# Altium footprint library LED_PCB_Large_Custom.PcbLib: 1 footprints
Each footprint in its own frame and in the unit in brackets; x right, y up, seen from the top. Pads: shape width x height; smd on the part's side, far side on the other; paste and mask are expansions set on the pad; w line width, h text height; cw(c..) or ccw(c..) is an arc to the next point about the centre after c.
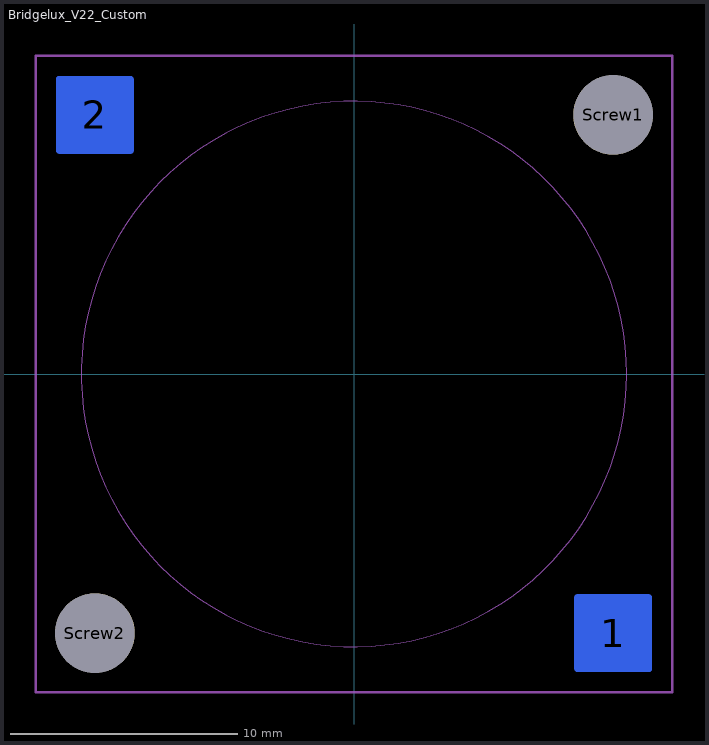
[diagram p0: the footprint, top view; thin cyan lines are the x and y axes]

## Bridgelux_V22_Custom [mm]
pads (4):
  rrect7% 3.4x3.4 smd far side paste-2539.97: 1(11.4,-11.4) 2(-11.4,11.4)
  round 3.5 hole 3.5 unplated: Screw1(11.4,11.4) Screw2(-11.4,-11.4)
LED Cutout Reference:
  circle w0.05: c0,0 r12
F.Fab:
  lines w0.1: -14,-14 -14,14 14,14 14,-14 -14,-14
  text "LED" at -0.508,-2.286 h1